# EAGLE library part 6103XX243021_610312243021 (library WR-PHD)
WR-PHD 2.54 mm SMT Dual Socket Header Bottom Entry ARTICLE PROPERTIES: Pins:4;​ 6;​ 8;​ 10;​ 12;​ 16;​ 18;​ 20;​ 22;​ 24;​ 26;​ 32;​ 34 KIND PROPERTIES: Pitch：2.54 mm Quality Class:3 as per CECC 75 301-802 Rows：Dual Gender：Socket Header Type：Bottom Entry Large MATERIAL PROPERTIES: Insulator Material PA9T Insulator Flammability Rating:UL94 V-0 Contact Material:Copper Alloy Contact Plating:Gold Contact Type:Stamped GENERAL INFORMATION Operating Temperature:-40 up to +125 °C Compliance:Lead free / RoHS ELECTRICAL PROPERTIES: Rated Current:3 A IR 1:3 A Withstanding Voltage:500 V (AC) Contact Resistance:20 mΩ RISO:1000 MΩ CERTIFICATION UL Approval:E323964 PACKAGING PROPERTIES Packaging:Tube <https://www.we-online.com/catalog/media/o33207v209%20Family_WR-PHD_610xxx243021.jpg> Details see: https://www.we-online.com/catalog/en/PHD_2_54_SMT_DUAL_SOCKET_HEADER_BOTTOM_ENTRY_6100XX243021 Updated by Ella Wu 2021-12-08 2021 (C) Würth Elektronik
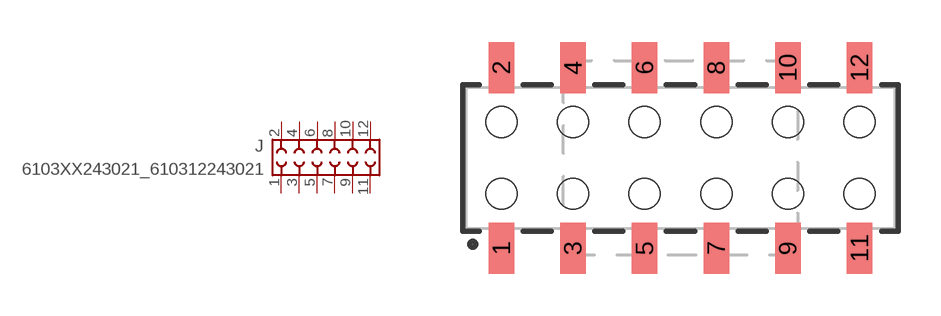
[diagram p206: symbol with the pads of 610312243021; footprint 610312243021]

Designator prefix J

## 6103XX243021_610312243021 (DATASHEET-URL: https://www.we-online.com/redexpert/spec/610312243021?ae; GENDER: Socket Header; IR: 3A; MOUNT: SMT; PACKAGING: Tape and Reel with Cap; PART-NUMBER: 610312243021; PINS: 12; PITCH: 2.54 mm; ROWS: Dual; TYPE: Bottom Entry Low Profile; VALUE: 610312243021)  [610312243021]
1  1  pas
2  2  pas
3  3  pas
4  4  pas
5  5  pas
6  6  pas
7  7  pas
8  8  pas
9  9  pas
10  10  pas
11  11  pas
12  12  pas

## Footprint 610312243021 (pad centres in mm)
WR-PHD 2.54 mm SMT Dual Socket Header Bottom Entry (Reel), 12 Pins
smd 0.9 x 1.8: 1 -6.35,-3.2; 2 -6.35,3.2; 3 -3.81,-3.2; 4 -3.81,3.2; 5 -1.27,-3.2; 6 -1.27,3.2; 7 1.27,-3.2; 8 1.27,3.2; 9 3.81,-3.2; 10 3.81,3.2; 11 6.35,-3.2; 12 6.35,3.2
hole 1.1 at -6.35,1.27
hole 1.1 at -3.81,1.27
hole 1.1 at -3.81,-1.27
hole 1.1 at -6.35,-1.27
hole 1.1 at -1.27,1.27
hole 1.1 at -1.27,-1.27
hole 1.1 at 1.27,1.27
hole 1.1 at 1.27,-1.27
hole 1.1 at 3.81,-1.27
hole 1.1 at 3.81,1.27
hole 1.1 at 6.35,1.27
hole 1.1 at 6.35,-1.27